# Altium footprint library MEMORY.PcbLib: 1 footprints
Each footprint in its own frame and in the unit in brackets; x right, y up, seen from the top. Pads: shape width x height; smd on the part's side, far side on the other; paste and mask are expansions set on the pad; w line width, h text height; cw(c..) or ccw(c..) is an arc to the next point about the centre after c.
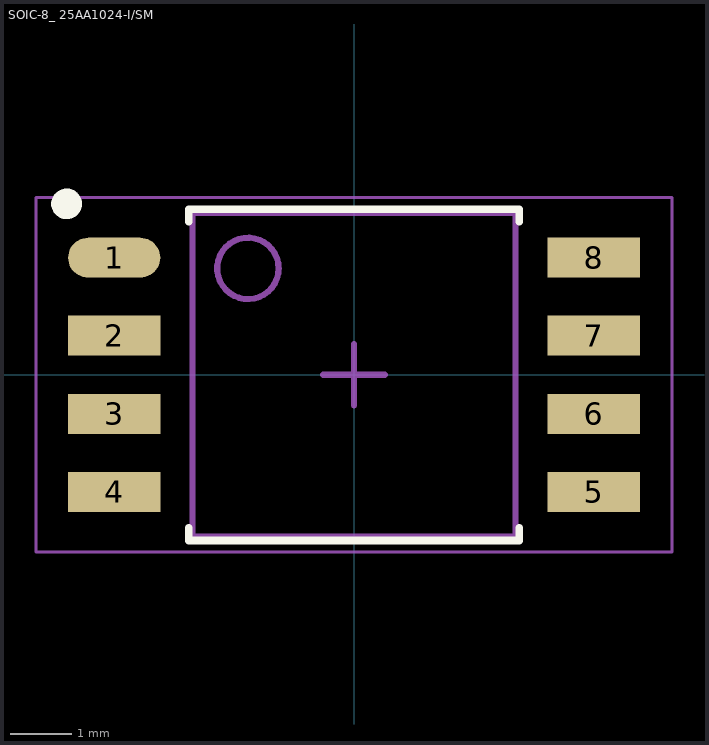
[diagram p0: the footprint, top view; thin cyan lines are the x and y axes]

## SOIC-8_ 25AA1024-I/SM [mm] "EEPROM, 1Mbit, SPI, max 20 MHz, 1.8V-5.5V"
height 2.03
pads (8):
  oval 1.5x0.65 smd: 1(-3.9,1.905)
  rect 1.5x0.65 smd: 2(-3.9,0.635) 3(-3.9,-0.635) 4(-3.9,-1.905) 5(3.9,-1.905) 6(3.9,-0.635) 7(3.9,0.635) 8(3.9,1.905)
Top Overlay:
  circle w0.25: c-4.675,2.78 r0.125
  lines w0.127: -2.689,-2.494 -2.689,-2.693 2.688,-2.693 2.688,-2.494 ; -2.689,2.494 -2.689,2.693 2.688,2.693 2.688,2.494
Mechanical 13:
  circle w0.1: c-1.725,1.73 r0.5
  lines w0.1: -2.625,-2.63 -2.625,2.63 2.625,2.63 2.625,-2.63 -2.625,-2.63
Mechanical 15:
  lines w0.05: -5.175,-2.88 -5.175,2.88 5.175,2.88 5.175,-2.88 -5.175,-2.88
  lines w0.1: -0.5,0 0.5,0 ; 0,-0.5 0,0.5
3D body "25AA1024-I_SM.stp": height 2.03, standoff 0, extent -3.97,-2.615 3.97,2.615